# Altium schematic symbol library WE-PD2_5848.SchLib: 1 symbol
Pins are listed as number, name and electrical type; pins without a type are passive.

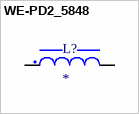
[diagram p0: symbol WE-PD2_5848]

## WE-PD2_5848
designator L?
2.2 ÂµH Unshielded Drum Core, Wirewound Inductor 4.6 A 41mOhm Max Nonstandard; MF: WÃ¼rth Elektronik; MP: 744774022; SnapEDA_Link: https://www.snapeda.com/parts/744774022/W%25C3%25BCrth+Elektronik+Midcom/view-part/?ref=snap; Package: Nonstandard Wurth Electronics; Value: *; Check_prices: https://www.snapeda.com/parts/744774022/W%25C3%25BCrth+Elektronik+Midcom/view-part/?ref=eda
footprint WE-PD2_5848
pins: 1, 2